# Altium schematic symbol library 0402WGF2201TCE.SchLib: 1 symbol
Pins are listed as number, name and electrical type; pins without a type are passive.

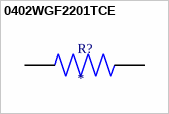
[diagram p0: symbol 0402WGF2201TCE]

## 0402WGF2201TCE
designator R?
2.2K Ohm 1/16W Thick Film Resistor 0402 Chip - Surface Mount; MF: Uni-Royal; MP: 0402WGF2201TCE; SnapEDA_Link: https://www.snapeda.com/parts/0402WGF2201TCE/Uni-Royal/view-part/?ref=snap; Package: 0402-2 ROYAL; Value: *; Check_prices: https://www.snapeda.com/parts/0402WGF2201TCE/Uni-Royal/view-part/?ref=eda
footprint RESC1005X40N
pins: 1, 2